# Altium schematic symbol library Localisation_Node.SCHLIB: 31 symbols
Pins are listed as number, name and electrical type; pins without a type are passive.

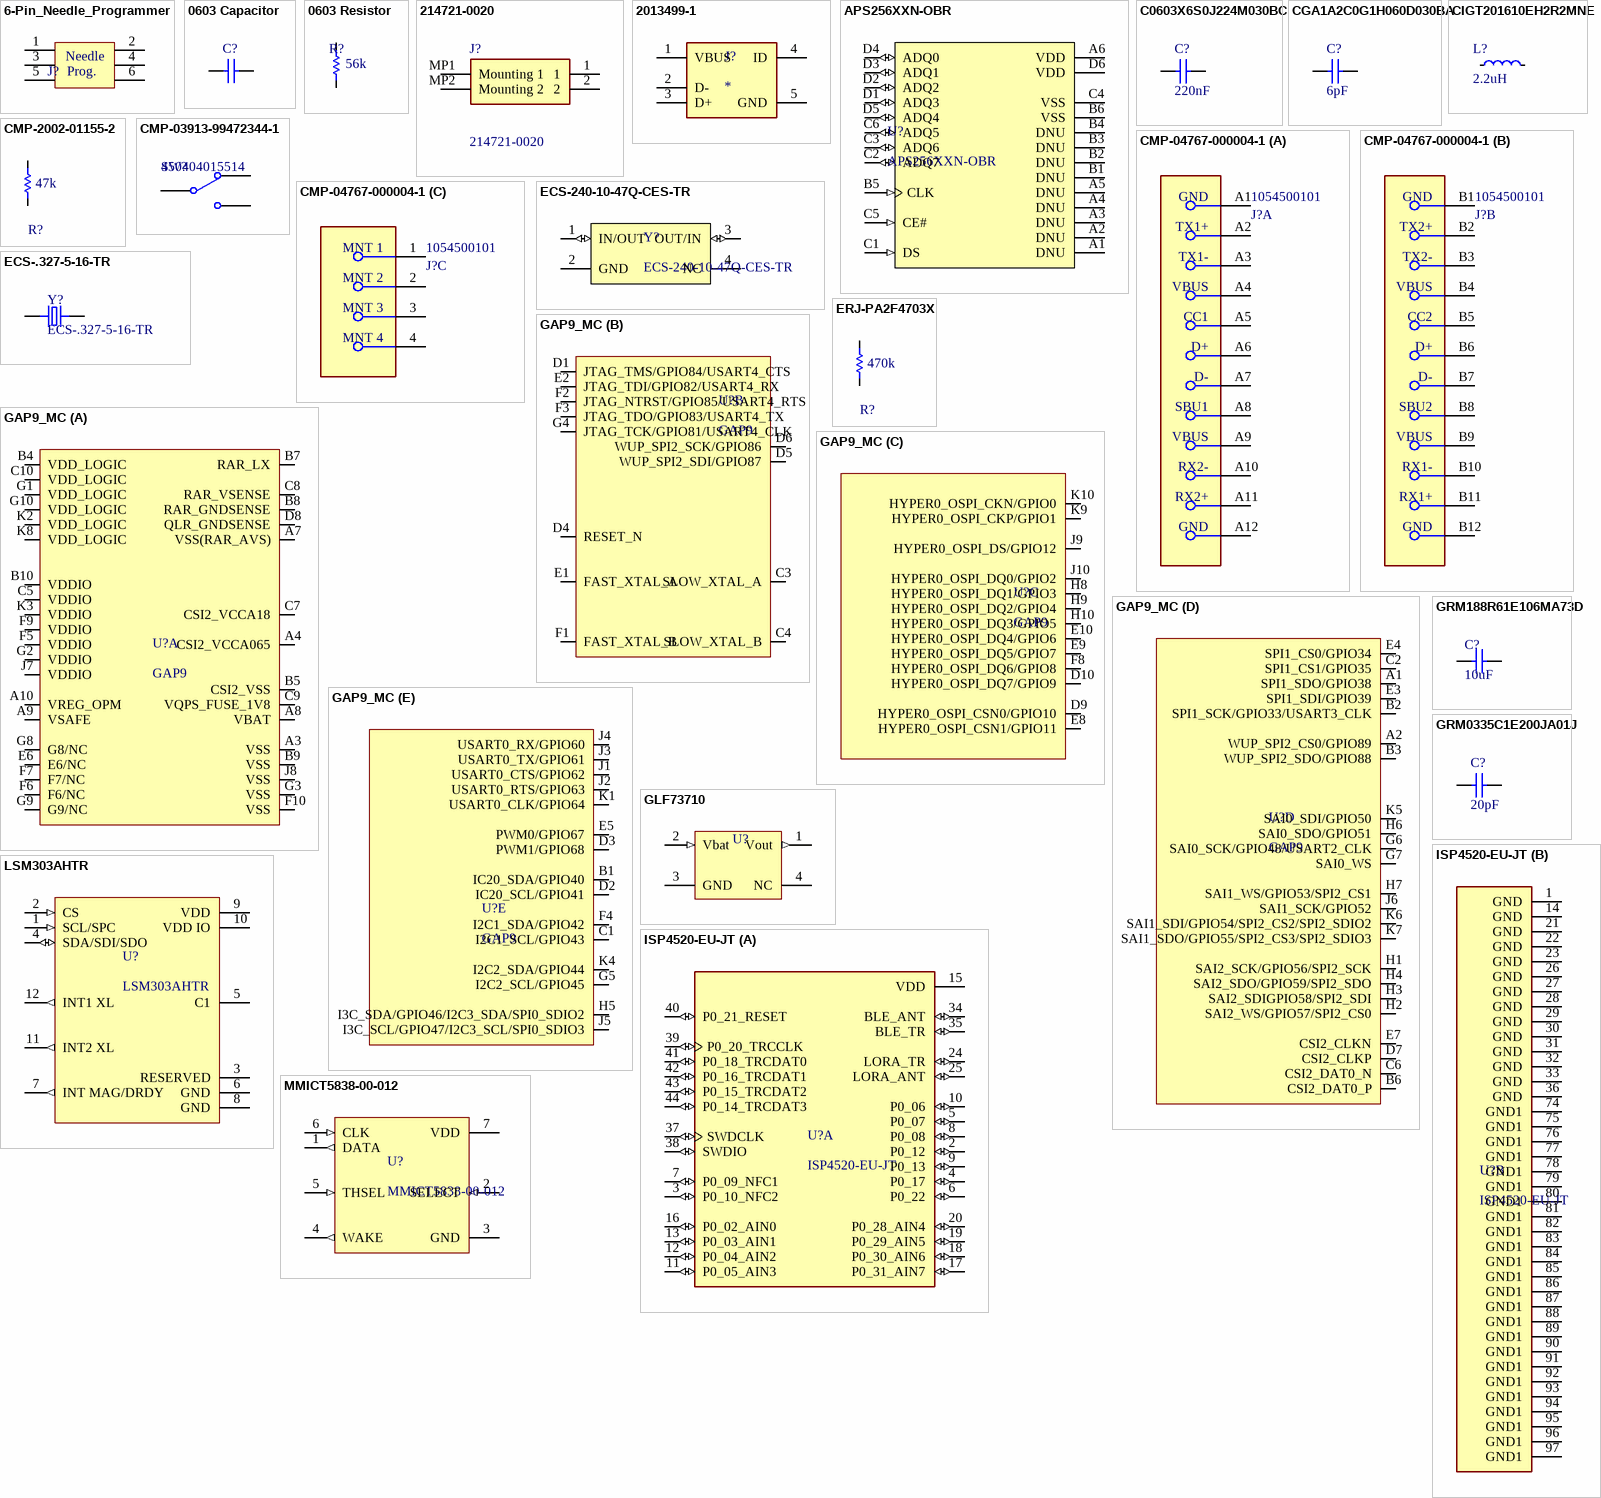
[diagram p0: symbols 6-Pin_Needle_Programmer to MMICT5838-00-012]

## 6-Pin_Needle_Programmer
designator J?, comment TC2030-MCP-NL  (value not drawn)
CABLE, TAG CONNECT, WITH OUT LEG, FOR IC; Number of Pins: 6; Package Quantity: 1; Packaging: Bulk; REACH SVHC: No SVHC; Lead Free: Lead Free
footprint 6-Pin_Needle_Programmer (TC2030-MCP-NL)
pins: 1, 2, 3, 4, 5, 6
text: Needle; Prog.

## 0603 Capacitor
designator C?
Tolerance: 20%; Value: *; Partnumber: *
footprint 0603_Capacitor (Capacitor 0603)
pins: 1, 2
1 alternate drawing of the same symbol

## 0603 Resistor
designator R?  value 56k
Partnumber: ERJ-3EKF5602V; Tolerance: 1%
footprint 0603_Resistor (Resistor 0603)
pins: 1 0, 2 1

## 214721-0020
designator J?
Headers & Wire Housings Header, 0.80mm Pitch 2 Circuits Reel; Manufacturer_Name: Molex; Geometry.Height: 1.8mm; Mouser Part Number: 538-214721-0020; Mouser Price/Stock: https://www.mouser.co.uk/ProductDetail/Molex/214721-0020?qs=MyNHzdoqoQJuaxNu%2FSk2cw%3D%3D; Manufacturer_Part_Number: 214721-0020; Datasheet Link: https://www.molex.com/pdm_docs/sd/2147210020_sd.pdf
footprint 2147210020
pins: 1, 2, MP1 Mounting 1, MP2 Mounting 2

## 2013499-1
designator J?
Connector; Manufacturer_Name: TE Connectivity; Manufacturer_Part_Number: 2013499-1; Datasheet Link: http://www.te.com/commerce/DocumentDelivery/DDEController?Action=showdoc&DocId=Customer+Drawing%7F2013499%7FB2%7Fpdf%7FEnglish%7FENG_CD_2013499_B2.pdf%7F2013499-1; Mouser Part Number: 571-2013499-1; Mouser Price/Stock: https://www.mouser.co.uk/ProductDetail/TE-Connectivity/2013499-1?qs=TL6PIybY3BOLK37GbUYdng%3D%3D; Arrow Part Number: 2013499-1; Arrow Price/Stock: https://www.arrow.com/en/products/2013499-1/te-connectivity?region=nac
footprint 2013499-1
pins: 1 VBUS, 2 D-, 3 D+, 4 ID, 5 GND

## APS256XXN-OBR
designator U?
No Description Available; Mfr_Name: AP Memory; Manufacturer_Part_Number: APS256XXN-OBR-BG; Copyright: Copyright (C) 2022 Ultra Librarian. All rights reserved.; RefDes: RefDes; Type: DEV
footprint WLCSP24
pins: A1 DNU, A2 DNU, A3 DNU, A4 DNU, A5 DNU, A6 VDD, B1 DNU, B2 DNU, B3 DNU, B4 DNU, B5 CLK (in), B6 VSS, C1 DS (in), C2 ADQ7 (io), C3 ADQ6 (io), C4 VSS, C5 CE# (in), C6 ADQ5 (io), D1 ADQ3 (io), D2 ADQ2 (io), D3 ADQ1 (io), D4 ADQ0 (io), D5 ADQ4 (io), D6 VDD

## C0603X6S0J224M030BC
designator C?, comment 220nF
CAP CER 0.22UF 6.3V X6S 0201; Manufacturer: TDK; Manufacturer Part Number: C0603X6S0J224M030BC; Dielectric Material: Ceramic; Tolerance: 20%; Supplier: Digi-Key; Supplier Part Number: 445-8003-6-ND; RoHS: Yes; Category: Ceramic Capacitors; Stock: 29480; Pricing: 1=0.18, 10=0.121, 50=0.0728, 100=0.0614, 500=0.04202, 1000=0.03717, 2500=0.03555, 5000=0.03232 (USD); Mounting Technology: Surface Mount; Case/Package: 0201; Case Code (Metric): 0603; Case Code (Imperial): 0201; Min Operating Temperature: -55°C; Max Operating Temperature: 105°C; Packaging: Tape and Reel; Value: 220nF; Dielectric: X6S; Package Quantity: 1; Voltage Rating: 6.3V; Series: C; Construction: Flat; Length: 0.6mm; Width: 0.012inch; Height: 0.3mm; Depth: 0.3mm; Thickness: 300um; Radiation Hardening: No; Reach SVHC Compliant: No; Lead Free: Lead Free; RoHS Compliant: Yes; ComponentLink1URL: https://datasheet.ciiva.com/26919/getdatasheetpartid-754557-26919175.pdf?src-supplier=Verical; ComponentLink1Description: https://datasheet.ciiva.com/26919/getdatasheetpartid-754557-26919175.pdf?src-supplier=Verical; ComponentLink2URL: https://datasheet.ciiva.com/6291/tdkmlcccaprange-6291929.pdf?src-supplier=Digi-Key; ComponentLink2Description: https://datasheet.ciiva.com/6291/tdkmlcccaprange-6291929.pdf?src-supplier=Digi-Key; ComponentLink3URL: https://datasheet.ciiva.com/6291/tdkmlcccaprange-6291931.pdf?src-supplier=Digi-Key; ComponentLink3Description: https://datasheet.ciiva.com/6291/tdkmlcccaprange-6291931.pdf?src-supplier=Digi-Key; ComponentLink4URL: https://datasheet.ciiva.com/6291/tdkmlcccaprange-6291933.pdf?src-supplier=Digi-Key; ComponentLink4Description: https://datasheet.ciiva.com/6291/tdkmlcccaprange-6291933.pdf?src-supplier=Digi-Key
footprint CAPC0603X33X15LL03T05 (Chip Capacitor, 2-Leads, Body 0.60x0.30mm, IPC High Density)
footprint CAPC0603X33X15NL03T05 (Chip Capacitor, 2-Leads, Body 0.60x0.30mm, IPC Medium Density)
footprint CAPC0603X33X15ML03T05 (Chip Capacitor, 2-Leads, Body 0.60x0.30mm, IPC Low Density)
pins: 1, 2
1 alternate drawing of the same symbol

## CGA1A2C0G1H060D030BA
designator C?, comment 6pF
Cap Ceramic 6pF 50V C0G 0.5pF SMD 0201 125°C Punched Paper T/R; Manufacturer: TDK; Manufacturer Part Number: CGA1A2C0G1H060D030BA; Supplier: Digi-Key; Supplier Part Number: 445-12055-6-ND; RoHS: Yes; Category: Ceramic Capacitors; Stock: 28912; Pricing: 1=0.11, 10=0.078, 50=0.0424, 100=0.0346, 500=0.02474, 1000=0.01944, 2500=0.01768, 5000=0.01626 (USD); Mounting Technology: Surface Mount; Case/Package: 0201; Case Code (Imperial): 0201; Case Code (Metric): 0603; Weight: 6E-06oz; Min Operating Temperature: -55°C; Max Operating Temperature: 125°C; Voltage Rating (DC): 50V; Packaging: Tape and Reel; Package Quantity: 15000; Value: 6pF; Voltage Rating: 50V; Dielectric: C0G; Termination: SMD/SMT; Series: CGA; Length: 0.024inch; Width: 0.012inch; Height: 0.3mm; Thickness: 0.012inch; Ratings: AEC-Q200; RoHS Compliant: Yes; ComponentLink1URL: http://www.mouser.com/ds/2/400/lcc_automotive_general_en-843974.pdf?src-supplier=Mouser; ComponentLink1Description: http://www.mouser.com/ds/2/400/lcc_automotive_general_en-843974.pdf?src-supplier=Mouser; ComponentLink2URL: https://product.tdk.com/info/en/documents/chara_sheet/CGA1A2C0G1H060D030BA.pdf?src-supplier=Digi-Key; ComponentLink2Description: https://product.tdk.com/info/en/documents/chara_sheet/CGA1A2C0G1H060D030BA.pdf?src-supplier=Digi-Key; ComponentLink3URL: https://product.tdk.com/info/en/catalog/datasheets/mlcc_automotive_general_en.pdf?src-supplier=Digi-Key; ComponentLink3Description: https://product.tdk.com/info/en/catalog/datasheets/mlcc_automotive_general_en.pdf?src-supplier=Digi-Key; ComponentLink4URL: http://product.tdk.com/capacitor/mlcc/en/documents/mlcc_automotive_general_en.pdf?src-supplier=Avnet; ComponentLink4Description: http://product.tdk.com/capacitor/mlcc/en/documents/mlcc_automotive_general_en.pdf?src-supplier=Avnet
footprint CAPC0603X33X15LL03T05 (Chip Capacitor, 2-Leads, Body 0.60x0.30mm, IPC High Density)
footprint CAPC0603X33X15NL03T05 (Chip Capacitor, 2-Leads, Body 0.60x0.30mm, IPC Medium Density)
footprint CAPC0603X33X15ML03T05 (Chip Capacitor, 2-Leads, Body 0.60x0.30mm, IPC Low Density)
pins: 1, 2
1 alternate drawing of the same symbol

## CIGT201610EH2R2MNE
designator L?, comment 2.2uH
Power Inductor : LxW size(mm) 2016 Thickness1 Inductance (uH) 20%: 2.2; Manufacturer: Samsung; Manufacturer Part Number: CIGT201610EH2R2MNE; Core Material: Metal,Composite; Tolerance: 20%; Saturation Current: 2.9A; Shielding: Unshielded; DC Resistance (DCR): 87mR; Test Frequency: 1MHz; Supplier: Digi-Key; Supplier Part Number: 1276-6901-6-ND; RoHS: Yes; Category: Fixed Inductors; Stock: 353238; Pricing: 1=0.28, 10=0.252, 25=0.2204, 50=0.189, 100=0.1733, 250=0.15756, 500=0.1481, 1000=0.11344 (USD); Mounting Technology: Surface Mount; Case/Package: 0806; Case Code (Imperial): 0806; Case Code (Metric): 2016; Min Operating Temperature: -40°C; Max Operating Temperature: 125°C; Packaging: Cut Tape; Value: 2.2uH; Series: CIGT; RoHS Compliant: Yes; ComponentLink1URL: http://www.samsungsem.com/kr/support/product-search/inductor/CIGT201610EH2R2MNE.jsp?src-supplier=Digi-Key; ComponentLink1Description: http://www.samsungsem.com/kr/support/product-search/inductor/CIGT201610EH2R2MNE.jsp?src-supplier=Digi-Key
footprint INDC2016X10N
pins: 1, 2

## CMP-2002-01155-2
designator R?, comment value 47k  (hidden comment: ERJ-2RKF4702X)
RES SMD 47K OHM 1% 1/10W 0402; Voltage Rating: 50V; Power Rating: 100mW; Temperature Coefficient: 100ppm/°C; Contact Plating: Tin; Radiation Hardening: No; Case/Package: 0402; Length: 1mm; Termination: SMD/SMT; RoHS Compliant: Yes; Resistor Type: Thick Film; Voltage Rating (DC): 50V; Depth: 0.5mm; Series: ERJ; Construction: Rectangular; REACH SVHC: No SVHC; Min Operating Temperature: -55°C; Packaging: Tape and Reel; Max Power Dissipation: 100mW; Military Standard: Not; Package Quantity: 1; Resistance Tolerance: 1%; Case Code (Metric): 1005; Technology: THICK FILM; Height: 0.35mm; Max Operating Temperature: 155°C; Number of Pins: 2; Tolerance: 1%; Case Code (Imperial): 0402; Width: 0.5mm; Number of Terminations: 2; Mount: Surface Mount; Features: Automotive AEC-Q200; Lead Free: Lead Free
footprint FP-ERJ2RK-IPC_C
pins: 1 0, 2 1

## CMP-03913-99472344-1
designator SW?, comment 450404015514
450404015514 Slide Switch, 0.3A, 5Vdc, Smd Rohs Compliant: Yes |Wurth Elektronik 450404015514; NexarPartId: 99472344; Current Rating: 300mA; Insulation Resistance: 100MΩ; Voltage Rating: 5V; Min Operating Temperature: -40°C; Contact Plating: Silver; Packaging: Tape and Reel; Max Operating Temperature: 85°C; RoHS: Compliant
footprint 450404015514 (Right angle Slide Switch)
pins: COM, L1, L2

## CMP-04767-000004-1
designator J?, comment 1054500101
CONN RCP USB3.1 TYPEC 24P SMD RA; Manufacturer: Molex; Number Of Contacts: 24; Voltage Rating: 30V; Shielding: true; Is Female: yes; Current Rating: 0.25/1.25/5A; Pitch: 0.5mm; Conn Orientation: Right Angle; Package: 0; Height: 3.44mm; Footprint Url: https://www.molex.com/pdm_docs/sd/1054500101_sd.pdf; Device Class L1: Connectors; Category: Conn; Device Class L2: USB Connectors; Digikey Description: CONN RCP USB3.1 TYPEC 24P SMD RA; Contact Material: Gold,Nickel; Mouser Description: USB Shielded I/O Receptacle; Type C; Right Angle; Surface Mount; Gold over Nickel; ComponentLink2Description: Datasheet; Lead Free: Yes; Automotive: No; Temperature Range High: +85°C; RoHS: TRUE; Octopart: https://octopart.com/105450-0101-molex-68082325; ComponentLink2URL: https://www.molex.com/webdocs/datasheets/pdf/en-us/1054500101_IO_CONNECTORS.pdf; Temperature: -30°C to +85°C; Usb Standard: USB 3.1; Temperature Range Low: -30°C; Device Class L3: unset; Manufacturer Part Number: 1054500101
footprint FP-1054500101-MFG
part A pins: A1 GND, A2 TX1+, A3 TX1-, A4 VBUS, A5 CC1, A6 D+, A7 D-, A8 SBU1, A9 VBUS, A10 RX2-, A11 RX2+, A12 GND
part B pins: B1 GND, B2 TX2+, B3 TX2-, B4 VBUS, B5 CC2, B6 D+, B7 D-, B8 SBU2, B9 VBUS, B10 RX1-, B11 RX1+, B12 GND
part C pins: 1 MNT 1, 2 MNT 2, 3 MNT 3, 4 MNT 4

## ECS-240-10-47Q-CES-TR
designator Y?
24MHz Â±10ppm Crystal 10pF 150 Ohms 4-SMD, No Lead; MF: ECS Inc.; Value: *; SnapEDA_Link: https://www.snapeda.com/parts/ECS-240-10-47Q-CES-TR/ECS%20Inc./view-part/4221464/?ref=snap; Price: None; Availability: Unavailable; Package: SMD-4 ECS International; MP: ECS-240-10-47Q-CES-TR
footprint XTAL_ECS-240-10-47Q-CES-TR
pins: 1 IN/OUT (io), 2 GND, 3 OUT/IN (io), 4 NC

## ECS-.327-5-16-TR
designator Y?
32.768kHz Â±20ppm Crystal 9pF 90 kOhms 2-SMD, No Lead; MF: ECS Inc.; MP: ECS-.327-9-16-TR; Value: *; SnapEDA_Link: https://www.snapeda.com/parts/ECS-.327-9-16-TR/ECS%20Inc./view-part/620864/?ref=snap; DigiKey-Purchase-URL: https://snapeda.com/shop?store=DigiKey&id=620864; Package: SMD-2 ECS International; Digi-Key_Part_Number: XC2132CT-ND
footprint XTAL_ECS-.327-5-16-TR
pins: 1, 2

## ERJ-PA2F4703X
designator R?  value 470k  (hidden comment: ERJ-PA2F4703X)
RES SMD 470K OHM 1% 1/5W 0402; Voltage Rating: 50V; Power Rating: 100mW; Temperature Coefficient: 100ppm/°C; Max Power Dissipation: 200mW; Contact Plating: Tin; Radiation Hardening: No; Case/Package: 0402; Length: 1mm; Termination: SMD/SMT; RoHS Compliant: Yes; Resistor Type: Thick Film; Voltage Rating (DC): 50V; Depth: 0.5mm; Series: ERJ; Construction: Rectangular; REACH SVHC: No SVHC; Min Operating Temperature: -55°C; Packaging: Tape and Reel; Military Standard: Not; Package Quantity: 1; Resistance Tolerance: 1%; Case Code (Metric): 1005; Technology: THICK FILM; Height: 0.35mm; Max Operating Temperature: 155°C; Number of Pins: 2; Tolerance: 1%; Case Code (Imperial): 0402; Width: 0.5mm; Number of Terminations: 2; Mount: Surface Mount; Features: Automotive AEC-Q200; Lead Free: Lead Free
footprint FP-ERJ2RK-IPC_C
pins: 1 0, 2 1

## GAP9_MC
designator U?, comment GAP9
footprint GAP9
part A pins: A3 VSS, A4 CSI2_VCCA065, A7 VSS(RAR_AVS), A8 VBAT, A9 VSAFE, A10 VREG_OPM, B4 VDD_LOGIC, B5 CSI2_VSS, B7 RAR_LX, B8 RAR_GNDSENSE, B9 VSS, B10 VDDIO, C5 VDDIO, C7 CSI2_VCCA18, C8 RAR_VSENSE, C9 VQPS_FUSE_1V8, C10 VDD_LOGIC, D8 QLR_GNDSENSE, E6 E6/NC, F5 VDDIO, F6 F6/NC, F7 F7/NC, F9 VDDIO, F10 VSS, G1 VDD_LOGIC, G2 VDDIO, G3 VSS, G8 G8/NC, G9 G9/NC, G10 VDD_LOGIC, J7 VDDIO, J8 VSS, K2 VDD_LOGIC, K3 VDDIO, K8 VDD_LOGIC
part B pins: C3 SLOW_XTAL_A, C4 SLOW_XTAL_B, D1 JTAG_TMS/GPIO84/USART4_CTS, D4 RESET_N, D5 WUP_SPI2_SDI/GPIO87, D6 WUP_SPI2_SCK/GPIO86, E1 FAST_XTAL_A, E2 JTAG_TDI/GPIO82/USART4_RX, F1 FAST_XTAL_B, F2 JTAG_NTRST/GPIO85/USART4_RTS, F3 JTAG_TDO/GPIO83/USART4_TX, G4 JTAG_TCK/GPIO81/USART4_CLK
part C pins: D9 HYPER0_OSPI_CSN0/GPIO10, D10 HYPER0_OSPI_DQ7/GPIO9, E8 HYPER0_OSPI_CSN1/GPIO11, E9 HYPER0_OSPI_DQ5/GPIO7, E10 HYPER0_OSPI_DQ4/GPIO6, F8 HYPER0_OSPI_DQ6/GPIO8, H8 HYPER0_OSPI_DQ1/GPIO3, H9 HYPER0_OSPI_DQ2/GPIO4, H10 HYPER0_OSPI_DQ3/GPIO5, J9 HYPER0_OSPI_DS/GPIO12, J10 HYPER0_OSPI_DQ0/GPIO2, K9 HYPER0_OSPI_CKP/GPIO1, K10 HYPER0_OSPI_CKN/GPIO0
part D pins: A1 SPI1_SDO/GPIO38, A2 WUP_SPI2_CS0/GPIO89, B2 SPI1_SCK/GPIO33/USART3_CLK, B3 WUP_SPI2_SDO/GPIO88, B6 CSI2_DAT0_P, C2 SPI1_CS1/GPIO35, C6 CSI2_DAT0_N, D7 CSI2_CLKP, E3 SPI1_SDI/GPIO39, E4 SPI1_CS0/GPIO34, E7 CSI2_CLKN, G6 SAI0_SCK/GPIO48/USART2_CLK, G7 SAI0_WS, H1 SAI2_SCK/GPIO56/SPI2_SCK, H2 SAI2_WS/GPIO57/SPI2_CS0, H3 SAI2_SDIGPIO58/SPI2_SDI, H4 SAI2_SDO/GPIO59/SPI2_SDO, H6 SAI0_SDO/GPIO51, H7 SAI1_WS/GPIO53/SPI2_CS1, J6 SAI1_SCK/GPIO52, K5 SAI0_SDI/GPIO50, K6 SAI1_SDI/GPIO54/SPI2_CS2/SPI2_SDIO2, K7 SAI1_SDO/GPIO55/SPI2_CS3/SPI2_SDIO3
part E pins: B1 IC20_SDA/GPIO40, C1 I2C1_SCL/GPIO43, D2 IC20_SCL/GPIO41, D3 PWM1/GPIO68, E5 PWM0/GPIO67, F4 I2C1_SDA/GPIO42, G5 I2C2_SCL/GPIO45, H5 I3C_SDA/GPIO46/I2C3_SDA/SPI0_SDIO2, J1 USART0_CTS/GPIO62, J2 USART0_RTS/GPIO63, J3 USART0_TX/GPIO61, J4 USART0_RX/GPIO60, J5 I3C_SCL/GPIO47/I2C3_SCL/SPI0_SDIO3, K1 USART0_CLK/GPIO64, K4 I2C2_SDA/GPIO44

## GLF73710
designator U?
full battery protection switch with over charge voltage, over discharge voltage and short circuit protection for lithium-Ion/Polymer battery safety; Manufacturer: GLF Integrated Power; Manufacturer Partnumber: GLF73710
footprint GLF73710
pins: 1 Vout (out), 2 Vbat (in), 3 GND (power), 4 NC

## GRM188R61E106MA73D
designator C?, comment 10uF
CAP CER 10UF 25V X5R 0603; Manufacturer: Murata; Manufacturer Part Number: GRM188R61E106MA73D; Supplier: Digi-Key; Supplier Part Number: 490-7202-6-ND; RoHS: Yes; Category: Ceramic Capacitors; Stock: 3353344; Pricing: 1=0.26, 10=0.176, 50=0.1176, 100=0.0999, 500=0.07054, 1000=0.06173 (USD); ComponentLink1URL: https://datasheet.ciiva.com/14906/partnumbering-e-01-14906429.pdf?src-supplier=Digi-Key; ComponentLink1Description: https://datasheet.ciiva.com/14906/partnumbering-e-01-14906429.pdf?src-supplier=Digi-Key; ComponentLink2URL: https://datasheet.ciiva.com/14906/partnumbering-e-01-14906431.pdf?src-supplier=Digi-Key; ComponentLink2Description: https://datasheet.ciiva.com/14906/partnumbering-e-01-14906431.pdf?src-supplier=Digi-Key; ComponentLink3URL: https://datasheet.ciiva.com/22776/608985-22776426.pdf?src-supplier=Farnell; ComponentLink3Description: https://datasheet.ciiva.com/22776/608985-22776426.pdf?src-supplier=Farnell; ComponentLink4URL: https://datasheet.ciiva.com/22776/c02e-22776427.pdf?src-supplier=Farnell; ComponentLink4Description: https://datasheet.ciiva.com/22776/c02e-22776427.pdf?src-supplier=Farnell; ComponentLink5URL: https://datasheet.ciiva.com/22619/c02e-22619674.pdf?src-supplier=Element14; ComponentLink5Description: https://datasheet.ciiva.com/22619/c02e-22619674.pdf?src-supplier=Element14
footprint FP-GRM188-0_2-IPC_A
footprint FP-GRM188-0_2-IPC_B
footprint FP-GRM188-0_2-IPC_C
footprint FP-GRM188-0_2-MFG
pins: 1, 2

## GRM0335C1E200JA01J
designator C?, comment 20pF
Cap Cer 20PF 25V NP0 0201; Manufacturer: Murata; Manufacturer Part Number: GRM0335C1E200JA01J; Tolerance: 5%; Dielectric: C0G; Supplier: Digi-Key; Supplier Part Number: GRM0335C1E200JA01J-ND; RoHS: Yes; Category: Ceramic Capacitors; Pricing: 50000=0.00155 (USD); Mounting Technology: Surface Mount; Case/Package: 0201; Case Code (Imperial): 0201; Case Code (Metric): 0603; Min Operating Temperature: -55°C; Max Operating Temperature: 125°C; Voltage Rating: 25V; Value: 20pF; Voltage Rating (DC): 25V; Packaging: Tape and Reel; Package Quantity: 50000; Termination: SMD/SMT; Series: GRM; Length: 0.6mm; Width: 0.3mm; Height: 0.3mm; RoHS Compliant: Yes; ComponentLink1URL: https://datasheet.ciiva.com/29539/partnumbering-e-01-29539003.pdf?src-supplier=Digi-Key; ComponentLink1Description: https://datasheet.ciiva.com/29539/partnumbering-e-01-29539003.pdf?src-supplier=Digi-Key
footprint CAPC0603X33X15LL03T05 (Chip Capacitor, 2-Leads, Body 0.60x0.30mm, IPC High Density)
footprint CAPC0603X33X15NL03T05 (Chip Capacitor, 2-Leads, Body 0.60x0.30mm, IPC Medium Density)
footprint CAPC0603X33X15ML03T05 (Chip Capacitor, 2-Leads, Body 0.60x0.30mm, IPC Low Density)
pins: 1, 2
1 alternate drawing of the same symbol

## ISP4520-EU-JT
designator U?
RF Modules; MF: Insight SiP; Availability: Unavailable; Package: None; Price: None; SnapEDA_Link: https://www.snapeda.com/parts/ISP4520-EU-JT/Insight%20SiP/view-part/4481343/?ref=snap; Value: *; MP: ISP4520-EU-JT; Supplier: Digi-Key; Supplier Part Number: 1786-ISP4520-EU-ST-ND
footprint XCVR_ISP4520-EU-JT
part A pins: 2 P0_12 (io), 3 P0_10_NFC2 (io), 4 P0_17 (io), 5 P0_07 (io), 6 P0_22 (io), 7 P0_09_NFC1 (io), 8 P0_08 (io), 9 P0_13 (io), 10 P0_06 (io), 11 P0_05_AIN3 (io), 12 P0_04_AIN2 (io), 13 P0_03_AIN1 (io), 15 VDD (power), 16 P0_02_AIN0 (io), 17 P0_31_AIN7 (io), 18 P0_30_AIN6 (io), 19 P0_29_AIN5 (io), 20 P0_28_AIN4 (io), 24 LORA_TR (io), 25 LORA_ANT (io), 34 BLE_ANT (io), 35 BLE_TR (io), 37 SWDCLK (io), 38 SWDIO (io), 39 P0_20_TRCCLK (io), 40 P0_21_RESET (io), 41 P0_18_TRCDAT0 (io), 42 P0_16_TRCDAT1 (io), 43 P0_15_TRCDAT2 (io), 44 P0_14_TRCDAT3 (io)
part B pins: 1 GND (power), 14 GND (power), 21 GND (power), 22 GND (power), 23 GND (power), 26 GND (power), 27 GND (power), 28 GND (power), 29 GND (power), 30 GND (power), 31 GND (power), 32 GND (power), 33 GND (power), 36 GND (power), 74 GND1 (power), 75 GND1 (power), 76 GND1 (power), 77 GND1 (power), 78 GND1 (power), 79 GND1 (power), 80 GND1 (power), 81 GND1 (power), 82 GND1 (power), 83 GND1 (power), 84 GND1 (power), 85 GND1 (power), 86 GND1 (power), 87 GND1 (power), 88 GND1 (power), 89 GND1 (power), 90 GND1 (power), 91 GND1 (power), 92 GND1 (power), 93 GND1 (power), 94 GND1 (power), 95 GND1 (power), 96 GND1 (power), 97 GND1 (power)

## LSM303AHTR
designator U?
e-Compass: 3D digital accelerometer, 3D digital magnetometer, LGA-2X2X1-12LD, RoHS; Manufacturer: STMicroelectronics; Supplier: Digi-Key; Supplier Part Number: 497-17053-6-ND; Manufacturer Part Number: LSM303AHTR; RoHS: Yes; Category: Inertial Measurement Units (IMUs); Stock: 7747; Pricing: 1=5.29, 10=3.968, 25=3.5272, 50=3.3508, 100=3.2627, 500=2.73362, 1000=2.55726 (USD); ComponentLink1URL: http://www.farnell.com/datasheets/2581668.pdf?src-supplier=Farnell; ComponentLink1Description: http://www.farnell.com/datasheets/2581668.pdf?src-supplier=Farnell; ComponentLink2URL: https://datasheet.octopart.com/LSM303AHTR-STMicroelectronics-datasheet-141402779.pdf?src-supplier=Element14; ComponentLink2Description: https://datasheet.octopart.com/LSM303AHTR-STMicroelectronics-datasheet-141402779.pdf?src-supplier=Element14; ComponentLink3URL: http://www.farnell.com/datasheets/2581668.pdf?src-supplier=Newark; ComponentLink3Description: http://www.farnell.com/datasheets/2581668.pdf?src-supplier=Newark; ComponentLink4URL: http://www.st.com/content/ccc/resource/technical/document/datasheet/1b/a1/fd/09/9f/41/44/cf/DM00177690.pdf/files/DM00177690.pdf/jcr:content/translations/en.DM00177690.pdf?src-supplier=Digi-Key; ComponentLink4Description: http://www.st.com/content/ccc/resource/technical/document/datasheet/1b/a1/fd/09/9f/41/44/cf/DM00177690.pdf/files/DM00177690.pdf/jcr:content/translations/en.DM00177690.pdf?src-supplier=Digi-Key
footprint FP-LGA12-8487206-MFG
pins: 1 SCL/SPC (in), 2 CS (in), 3 RESERVED, 4 SDA/SDI/SDO (io), 5 C1, 6 GND (power), 7 INT MAG/DRDY (out), 8 GND (power), 9 VDD (power), 10 VDD IO (power), 11 INT2 XL (out), 12 INT1 XL (out)

## MMICT5838-00-012
designator U?
Coming Soon: Bottom Port PDM Digital Output Multi-Mode Output; Manufacturer: TDK InvenSense; Supplier: Digi-Key; Supplier Part Number: 1428-MMICT5838-00-012CT-ND; Manufacturer Part Number: MMICT5838-00-012; RoHS: No; Stock: 9900; Pricing: 1=2.51, 10=2.076, 25=1.9164, 50=1.8004, 100=1.689, 500=1.44702, 1000=1.43117 (USD); ComponentLink1URL: https://datasheet.octopart.com/MMICT5838-00-012-InvenSense-datasheet-165589132.pdf?src-supplier=Component+Distributors+Inc.; ComponentLink1Description: https://datasheet.octopart.com/MMICT5838-00-012-InvenSense-datasheet-165589132.pdf?src-supplier=Component+Distributors+Inc.
footprint T5838
footprint T5838 - RF
pins: 1 DATA (out), 2 SELECT (in), 3 GND, 4 WAKE (out), 5 THSEL (in), 6 CLK (in), 7 VDD

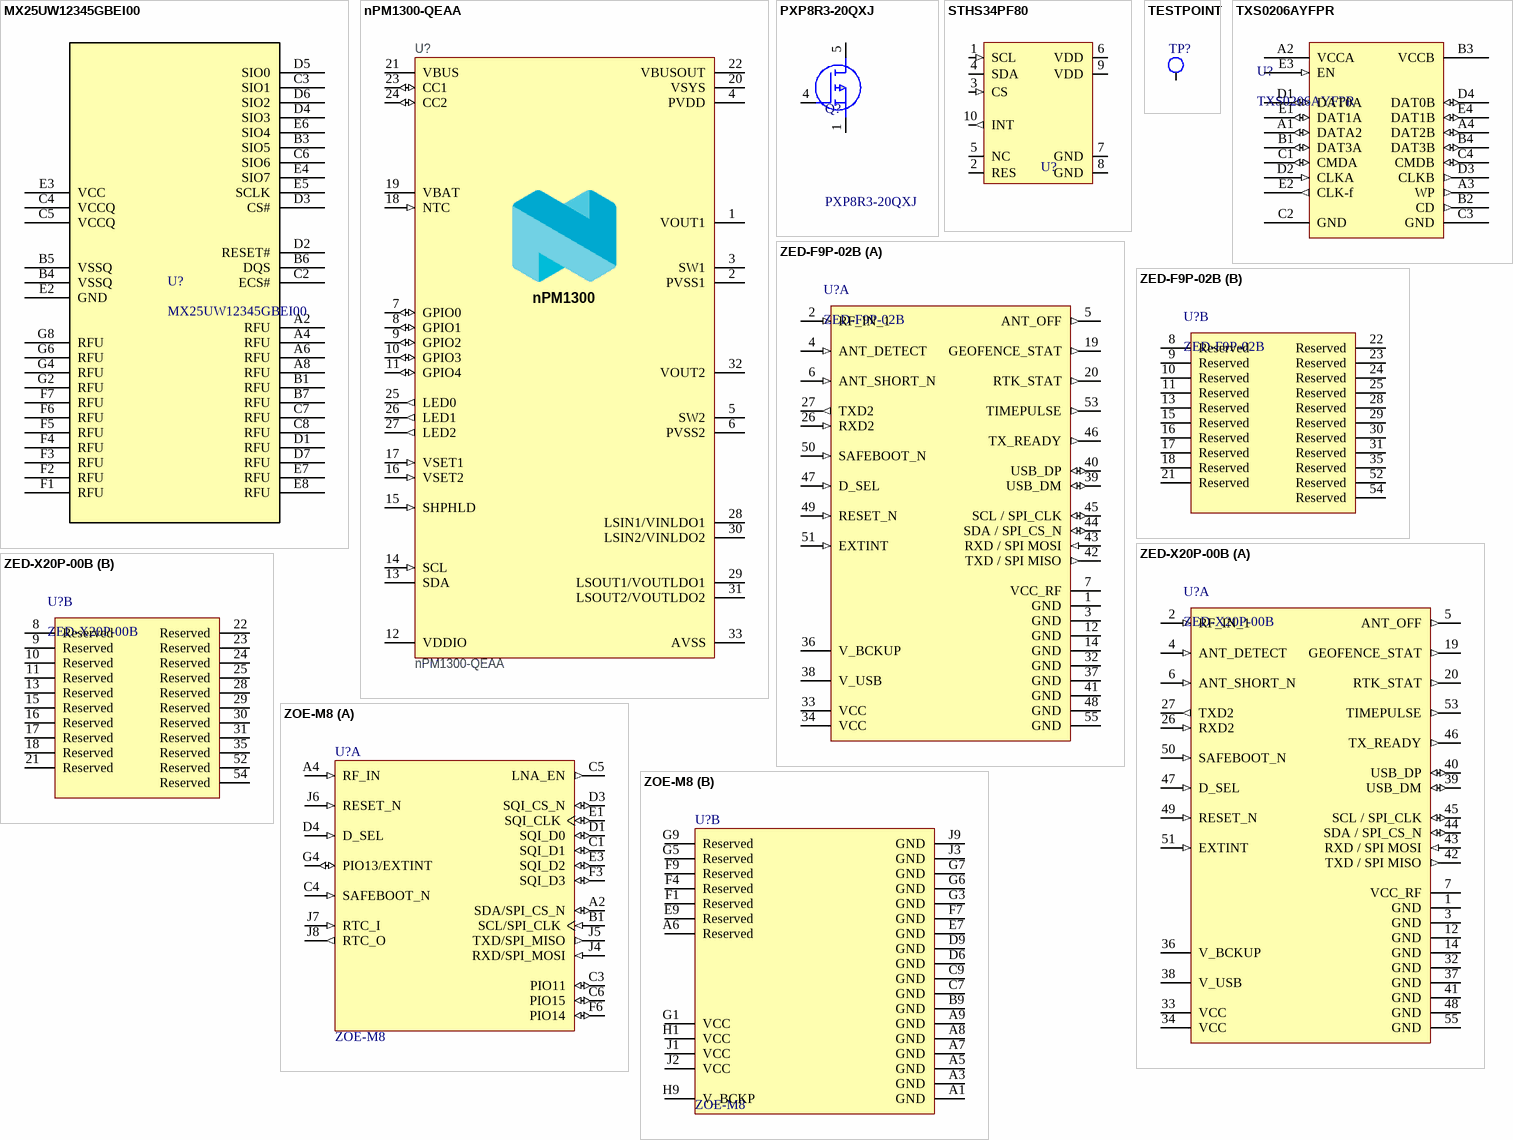
[diagram p1: symbols MX25UW12345GBEI00 to ZOE-M8]

## MX25UW12345GBEI00
designator U?
Macronix 128 Mbit PSRAM
footprint MX25UW12345GBEI00 (128Mbit Flash)
pins: A2 RFU, A4 RFU, A6 RFU, A8 RFU, B1 RFU, B3 SIO5, B4 VSSQ, B5 VSSQ, B6 DQS, B7 RFU, C2 ECS#, C3 SIO1, C4 VCCQ, C5 VCCQ, C6 SIO6, C7 RFU, C8 RFU, D1 RFU, D2 RESET#, D3 CS#, D4 SIO3, D5 SIO0, D6 SIO2, D7 RFU, E2 GND, E3 VCC, E4 SIO7, E5 SCLK, E6 SIO4, E7 RFU, E8 RFU, F1 RFU, F2 RFU, F3 RFU, F4 RFU, F5 RFU, F6 RFU, F7 RFU, G2 RFU, G4 RFU, G6 RFU, G8 RFU

## nPM1300-QEAA
designator U?
Li-Ion/Li-Polymer USB-C battery charger with high efficiency buck regulators, LDOs or load switches, LED drivers, TWI and VBUSOUT; Manufacturer: Nordic Semiconductor; Part number NEMS: 102000252; Component Status: Active; Pad Count: 33; Note: N.A.; Part Number: nPM1300-QEAA; PartId: 102000252; Component Class: nRF_Devices; Author: eisk; Manufacturer Part Number: nPM1300-QEAA; ComponentLink1URL: N.A.; ComponentLink1Description: Datasheet; ComponentLink2URL: N.A.; ComponentLink2Description: Supplier link; HelpURL: N.A.; LatestRevisionDate: 2022-11-14; Published: 2022-02-17; Footprint Doc: QFN-32; Value: nPM1300-QEAA; Supplier 1: Nordic Semiconductor; Supplier Part Number 1: nPM1300-QEAA; Supplier 2: N.A.; Supplier Part Number 2: N.A.; Artikkelnr Noca: N.A.; Part number IPS: N.A.; Part number Norautron: N.A.
footprint Nordic_QFN50P500X500X90-33N
pins: 1 VOUT1 (power), 2 PVSS1 (power), 3 SW1 (power), 4 PVDD (power), 5 SW2 (power), 6 PVSS2 (power), 7 GPIO0 (io), 8 GPIO1 (io), 9 GPIO2 (io), 10 GPIO3 (io), 11 GPIO4 (io), 12 VDDIO (power), 13 SDA (oc), 14 SCL (in), 15 SHPHLD (in), 16 VSET2 (in), 17 VSET1 (in), 18 NTC (in), 19 VBAT, 20 VSYS (power), 21 VBUS (power), 22 VBUSOUT (power), 23 CC1 (io), 24 CC2 (io), 25 LED0 (out), 26 LED1 (out), 27 LED2 (out), 28 LSIN1/VINLDO1 (power), 29 LSOUT1/VOUTLDO1 (power), 30 LSIN2/VINLDO2 (power), 31 LSOUT2/VOUTLDO2 (power), 32 VOUT2 (power), 33 AVSS (power)
text: nPM1300

## PXP8R3-20QXJ
designator Q?
PXP8R3-20QX - 20 V, P-channel Trench MOSFET@en-us; Manufacturer_Name: Nexperia; Geometry.Height: 0.9mm; Mouser Part Number: 771-PXP8R3-20QXJ; Mouser Price/Stock: https://www.mouser.co.uk/ProductDetail/Nexperia/PXP8R3-20QXJ?qs=A6eO%252BMLsxmRScf%252Bn%252BNjP3g%3D%3D; Manufacturer_Part_Number: PXP8R3-20QXJ; Datasheet Link: https://assets.nexperia.com/documents/data-sheet/PXP8R3-20QX.pdf
footprint PXP8R320QXJ
pins: 1 S, 2 S, 3 S, 4 G, 5 D, 6 D, 7 D, 8 D

## STHS34PF80
designator U?
low-power, high-sensitivity infrared (IR) sensor for presence and motion detection
footprint OLGA-10_3P2X4P2_STM
pins: 1 SCL (in), 2 RES, 3 CS (in), 4 SDA (io), 5 NC, 6 VDD, 7 GND, 8 GND, 9 VDD, 10 INT (out)

## TESTPOINT
designator TP?
1mm diameter copper pad as testpoint
footprint TESTPOINT_PAD (1mm diameter circular pad)
pins: 0

## TXS0206AYFPR
designator U?
SD Card Voltage Translation Transceiver 20-Pin DSBGA T/R; Manufacturer: Texas Instruments; Max Supply Voltage: 3.6V; Min Supply Voltage: 1.1V; Data Rate: 60Mbps; Number of Channels: 4; Propagation Delay: 3.2ns; Channel Type: Bidirectional; Number of Circuits: 1; Logic Function: Translator; Supplier 1: Digi-Key; Manufacturer Part Number: TXS0206AYFPR; RoHS: Yes; Category: Interface ICs; Stock 1: 2864; Pricing 1: 1=1.65000, 10=1.47100, 25=1.39600, 100=1.14660, 250=1.07180, 500=0.94718, 1000=0.74778 (USD); Mount: Surface Mount; Number of Pins: 20; Min Operating Temperature: -40°C; Max Operating Temperature: 85°C; Package Quantity: 3000; Packaging: Tape and Reel; Number of Bits: 4; Output Type: Voltage; Radiation Hardening: No; Lead Free: Lead Free; ComponentLink1URL: https://datasheet.ciiva.com/12253/sces833a-127327-12253648.pdf?src-supplier=Mouser; ComponentLink1Description: https://datasheet.ciiva.com/12253/sces833a-127327-12253648.pdf?src-supplier=Mouser; ComponentLink2URL: https://datasheet.ciiva.com/14194/txs0206a-14194885.pdf?src-supplier=Avnet; ComponentLink2Description: https://datasheet.ciiva.com/14194/txs0206a-14194885.pdf?src-supplier=Avnet; ComponentLink3URL: https://datasheet.ciiva.com/29616/txs0206a-29616010.pdf?src-supplier=Digi-Key; ComponentLink3Description: https://datasheet.ciiva.com/29616/txs0206a-29616010.pdf?src-supplier=Digi-Key; ComponentLink4URL: https://datasheet.ciiva.com/29616/txs0206a-29616011.pdf?src-supplier=Digi-Key; ComponentLink4Description: https://datasheet.ciiva.com/29616/txs0206a-29616011.pdf?src-supplier=Digi-Key; Supplier Part Number 1: 296-36872-1-ND
footprint BGA9C40P4X5_156X196X50 (BGA, 9-Leads, Body 1.56x1.96mmx0.50mm, Pitch 0.40mm)
pins: A1 DATA2 (io), A2 VCCA (power), A3 WP (out), A4 DAT2B (io), B1 DAT3A (io), B2 CD (out), B3 VCCB (power), B4 DAT3B (io), C1 CMDA (io), C2 GND, C3 GND, C4 CMDB (io), D1 DAT0A (io), D2 CLKA (in), D3 CLKB (out), D4 DAT0B (io), E1 DAT1A (io), E2 CLK-f (out), E3 EN (in), E4 DAT1B (io)

## ZED-F9P-02B
designator U?
U-BLOX F9 DUAL BAND GNSS HIGH PR; Part Number: ZED-F9P-00B; Frequency: 1.2276GHz, 1.575GHz; Sensitivity: -167dBm; Data Rate (Max): 921.6kbps; Modulation or Protocol: BeiDou, Galileo, GLONASS, GNSS, GPS; Data Interface: I²C, SPI, UART, USB; Voltage - Supply: 2.7V ~ 3.6V; Manufacturer: u-blox; Series: ZED-F9P; Applications: General Purpose; Current - Receiving: -; Memory Size: -; Antenna Connector: -; Features: -; Operating Temperature: -40°C ~ 85°C; Mounting Type: Surface Mount; Package / Case: 54-SMD Module; Supplier Device Package: 54-LGA (22x17)
footprint ZED-F9P (Multi-band GNSS receiver)
part A pins: 1 GND (power) "GPIO", 2 RF_IN_1 (in) "External reset input", 3 GND (power) "GPIO", 4 ANT_DETECT (in) "GPIO", 5 ANT_OFF (out) "GPIO", 6 ANT_SHORT_N (in) "Power-on input", 7 VCC_RF (power) "External reset input", 12 GND (power) "UART data terminal ready", 14 GND (power) "UART ring indicator", 19 GEOFENCE_STAT (out) "Differential analog audio input (negative)", 20 RTK_STAT (out) "Ground", 26 RXD2 (in) "SIM reset", 27 TXD2 (out) "SIM clock", 32 GND (power) "I2S clock/GPIO", 33 VCC (power) "I2S receive data/GPIO", 34 VCC (power) "I2S transmit data/GPIO", 36 V_BCKUP (power) "I2C bus clock line", 37 GND (power), 38 V_USB (power), 39 USB_DM (io), 40 USB_DP (io), 41 GND (power), 42 TXD / SPI MISO (out), 43 RXD / SPI MOSI (in), 44 SDA / SPI_CS_N (io), 45 SCL / SPI_CLK (io), 46 TX_READY (out), 47 D_SEL (in), 48 GND (power), 49 RESET_N (in), 50 SAFEBOOT_N (in), 51 EXTINT (in), 53 TIMEPULSE (out), 55 GND (power)
part B pins: 8 Reserved "UART data input", 9 Reserved "UART data output", 10 Reserved "UART ready to send", 11 Reserved "UART clear to send", 13 Reserved "UART data set ready", 15 Reserved "UART data carrier detect", 16 Reserved "Auxiliary UART transmitted data", 17 Reserved "Auxiliary UART received data", 18 Reserved "Differential analog audio input (positive)", 21 Reserved "Differential analog audio output (negative)", 22 Reserved "Differential analog audio output (positive)", 23 Reserved "Microphone supply output", 24 Reserved "Antenna detection", 25 Reserved "RF input/output", 28 Reserved "SIM data", 29 Reserved "SIM supply output", 30 Reserved "SIM detection", 31 Reserved "I2S word alignment/GPIO", 35 Reserved "I2C bus data line", 52 Reserved, 54 Reserved

## ZED-X20P-00B
designator U?
U-BLOX X20P high precision; Part Number: ZED-F9P-00B; Frequency: 1.2276GHz, 1.575GHz; Sensitivity: -167dBm; Data Rate (Max): 921.6kbps; Modulation or Protocol: BeiDou, Galileo, GLONASS, GNSS, GPS; Data Interface: I²C, SPI, UART, USB; Voltage - Supply: 2.7V ~ 3.6V; Manufacturer: u-blox; Series: ZED-F9P; Applications: General Purpose; Current - Receiving: -; Memory Size: -; Antenna Connector: -; Features: -; Operating Temperature: -40°C ~ 85°C; Mounting Type: Surface Mount; Package / Case: 54-SMD Module; Supplier Device Package: 54-LGA (22x17)
footprint ZED-F9P (Multi-band GNSS receiver)
part A pins: 1 GND (power) "GPIO", 2 RF_IN_1 (in) "External reset input", 3 GND (power) "GPIO", 4 ANT_DETECT (in) "GPIO", 5 ANT_OFF (out) "GPIO", 6 ANT_SHORT_N (in) "Power-on input", 7 VCC_RF (power) "External reset input", 12 GND (power) "UART data terminal ready", 14 GND (power) "UART ring indicator", 19 GEOFENCE_STAT (out) "Differential analog audio input (negative)", 20 RTK_STAT (out) "Ground", 26 RXD2 (in) "SIM reset", 27 TXD2 (out) "SIM clock", 32 GND (power) "I2S clock/GPIO", 33 VCC (power) "I2S receive data/GPIO", 34 VCC (power) "I2S transmit data/GPIO", 36 V_BCKUP (power) "I2C bus clock line", 37 GND (power), 38 V_USB (power), 39 USB_DM (io), 40 USB_DP (io), 41 GND (power), 42 TXD / SPI MISO (out), 43 RXD / SPI MOSI (in), 44 SDA / SPI_CS_N (io), 45 SCL / SPI_CLK (io), 46 TX_READY (out), 47 D_SEL (in), 48 GND (power), 49 RESET_N (in), 50 SAFEBOOT_N (in), 51 EXTINT (in), 53 TIMEPULSE (out), 55 GND (power)
part B pins: 8 Reserved "UART data input", 9 Reserved "UART data output", 10 Reserved "UART ready to send", 11 Reserved "UART clear to send", 13 Reserved "UART data set ready", 15 Reserved "UART data carrier detect", 16 Reserved "Auxiliary UART transmitted data", 17 Reserved "Auxiliary UART received data", 18 Reserved "Differential analog audio input (positive)", 21 Reserved "Differential analog audio output (negative)", 22 Reserved "Differential analog audio output (positive)", 23 Reserved "Microphone supply output", 24 Reserved "Antenna detection", 25 Reserved "RF input/output", 28 Reserved "SIM data", 29 Reserved "SIM supply output", 30 Reserved "SIM detection", 31 Reserved "I2S word alignment/GPIO", 35 Reserved "I2C bus data line", 52 Reserved, 54 Reserved

## ZOE-M8
designator U?
u-blox M8 low power concurrent GNSS S-LGA 1.8 V SiP, TCXO, ROM, 4.5x4.5 mm; Manufacturer Part Number: ZOE-M8B; Protocol: BeiDou, Galileo, GLONASS, GPS, GNSS; Sensitivity: -160dBm; Serial Interfaces: SPI, UART; Antenna Type: Not Included, Castellation; Voltage Supply: 1.71 V ~ 1.89 V; Current - Transmitting: 40mA; Manufacturer: u-blox; Mounting Type: Surface Mount; Operating Temperature: -40°C ~ 85°C; Package / Case: 51-SMD Module
footprint ZOE-M8B (LGA, 51-Leads, Body 4.50x4.50mmx1.20mm, Pitch 0.50mm)
part A pins: A2 SDA/SPI_CS_N (io), A4 RF_IN (in), B1 SCL/SPI_CLK (in), C1 SQI_D1 (io), C3 PIO11 (io), C4 SAFEBOOT_N (in), C5 LNA_EN (out), C6 PIO15 (io), D1 SQI_D0 (io), D3 SQI_CS_N (io), D4 D_SEL (in), E1 SQI_CLK (io), E3 SQI_D2 (io), F3 SQI_D3 (io), F6 PIO14 (io), G4 PIO13/EXTINT (io), J4 RXD/SPI_MOSI (in), J5 TXD/SPI_MISO (out), J6 RESET_N (in), J7 RTC_I (in), J8 RTC_O (out)
part B pins: A1 GND (power), A3 GND (power), A5 GND (power), A6 Reserved, A7 GND (power), A8 GND (power), A9 GND (power), B9 GND (power), C7 GND (power), C9 GND (power), D6 GND (power), D9 GND (power), E7 GND (power), E9 Reserved, F1 Reserved, F4 Reserved, F7 GND (power), F9 Reserved, G1 VCC (power), G3 GND (power), G5 Reserved, G6 GND (power), G7 GND (power), G9 Reserved, H1 VCC (power), H9 V_BCKP (power), J1 VCC (power), J2 VCC (power), J3 GND (power), J9 GND (power)